# Altium footprint library PBL - THD Packages.PcbLib: 160 footprints (part 5 of 10)
Each footprint in its own frame and in the unit in brackets; x right, y up, seen from the top. Pads: shape width x height; smd on the part's side, far side on the other; paste and mask are expansions set on the pad; w line width, h text height; cw(c..) or ccw(c..) is an arc to the next point about the centre after c.
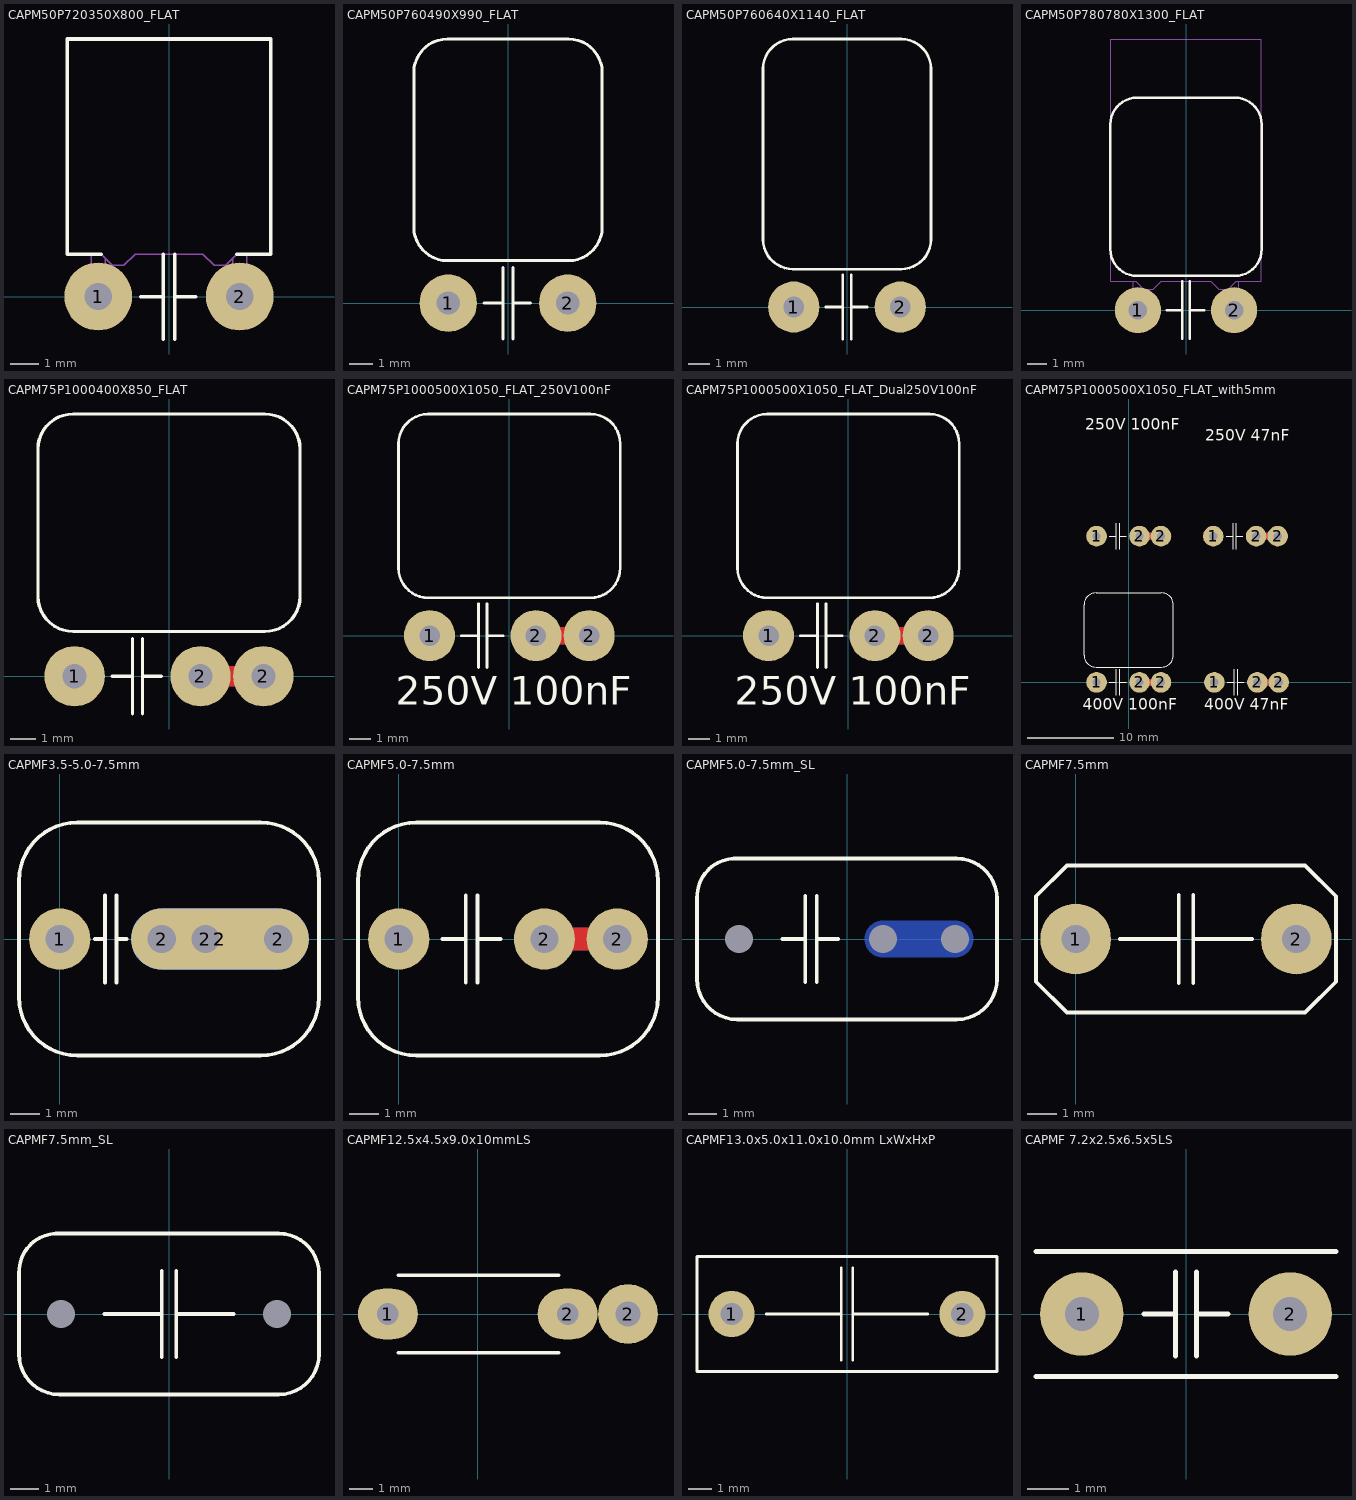
[diagram p4: the footprints below, top view; thin cyan lines are the x and y axes]

## CAPM50P720350X800_FLAT [mm] "Capacitor, THT, Metallized Polyester Film with 7.2x3.5x8.0mm LxTxH"
height 3.5
pads (2):
  round 2.4 hole 0.965: 1(-2.5,0) 2(2.5,0)
Top Overlay:
  lines w0.127: -2.4,1.5 -3.6,1.5 -3.6,9.1 3.6,9.1 3.6,1.5 2.4,1.5 ; -1,0 -0.2,0 ; -0.2,-1.5 -0.2,1.5 ; 0.2,-1.5 0.2,1.5 ; 0.2,0 0.95,0
13 - 3D Top Side:
  lines w0.05: -2.75,0.75 -2.25,0.75 ; -2.75,1.5 -2.75,0 ccw(c-2.5,0) -2.25,0 -2.25,1.35 ; 2.25,0.75 2.75,0.75 ; 2.25,1.35 2.25,0 ccw(c2.5,0) 2.75,0 2.75,1.5 ; -3.6,1.5 -3.6,9.1 3.6,9.1 3.6,1.5 2.4,1.5 2,1.1 1.6,1.1 1.2,1.5 -1.2,1.5 -1.6,1.1 -2,1.1 -2.4,1.5 -3.6,1.5
3D body: height 3.5, standoff -1.78, extent -3.6,-0.249 3.6,9.1

## CAPM50P760490X990_FLAT [mm] "Capacitor, THT, Metallized Polyester Film with 7.2x4.5x9.5mm LxTxH"
height 4.9
pads (2):
  round 2.4 hole 0.965: 1(-2.5,0) 2(2.5,0)
Top Overlay:
  lines w0.127: -1,0 -0.2,0 ; -0.2,-1.5 -0.2,1.5 ; 0.2,-1.5 0.2,1.5 ; 0.2,0 0.95,0 ; -3.937,3.175 ccw(c-2.54,3.175) -2.54,1.778 2.54,1.778 ccw(c2.54,3.175) 3.937,3.175 3.937,9.652 ccw(c2.54,9.652) 2.54,11.049 -2.54,11.049 ccw(c-2.54,9.652) -3.937,9.652 -3.937,3.175
3D body: height 4.9, standoff -1.78, extent -3.8,-0.249 3.8,11

## CAPM50P760640X1140_FLAT [mm] "Capacitor, THT, Metallized Polyester Film with 6.0x11.0x7.2mm TxHxW"
height 6.4
pads (2):
  round 2.4 hole 0.965: 1(-2.5,0) 2(2.5,0)
Top Overlay:
  lines w0.127: -1,0 -0.2,0 ; -0.2,-1.5 -0.2,1.5 ; 0.2,-1.5 0.2,1.5 ; 0.2,0 0.95,0 ; -3.937,3.175 ccw(c-2.54,3.175) -2.54,1.778 2.54,1.778 ccw(c2.54,3.175) 3.937,3.175 3.937,11.176 ccw(c2.54,11.176) 2.54,12.573 -2.54,12.573 ccw(c-2.54,11.176) -3.937,11.176 -3.937,3.175
3D body: height 6.4, standoff -1.78, extent -3.8,-0.249 3.8,12.5

## CAPM50P780780X1300_FLAT [mm] "Capacitor, THT, Metallized Polyester Film with 7.8x7.8x13.0mm LxTxH"
height 7.8
pads (2):
  round 2.4 hole 0.965: 1(-2.5,0) 2(2.5,0)
Top Overlay:
  lines w0.127: -1,0 -0.2,0 ; -0.2,-1.5 -0.2,1.5 ; 0.2,-1.5 0.2,1.5 ; 0.2,0 0.95,0 ; -3.937,3.175 ccw(c-2.54,3.175) -2.54,1.778 2.54,1.778 ccw(c2.54,3.175) 3.937,3.175 3.937,9.652 ccw(c2.54,9.652) 2.54,11.049 -2.54,11.049 ccw(c-2.54,9.652) -3.937,9.652 -3.937,3.175
13 - 3D Top Side:
  lines w0.05: -2.75,0.75 -2.25,0.75 ; -2.75,1.5 -2.75,0 ccw(c-2.5,0) -2.25,0 -2.25,1.15 ; 2.25,0.75 2.75,0.75 ; 2.25,1.15 2.25,0 ccw(c2.5,0) 2.75,0 2.75,1.5 ; -3.9,1.5 -3.9,14.1 3.9,14.1 3.9,1.5 2.6,1.5 2.2,1.1 1.7,1.1 1.3,1.5 -1.3,1.5 -1.7,1.1 -2.2,1.1 -2.6,1.5 -3.9,1.5
3D body: height 7.8, standoff -1.78, extent -3.9,-0.249 3.9,14.1

## CAPM75P1000400X850_FLAT [mm] "Capacitor, THT, Metallized Polyester Film with 3.5x9.5x10.0mm TxHxW"
height 3.5
pads (3):
  round 2.4 hole 0.965: 1(-3.75,0) 2(1.25,0) 2(3.75,0)
Top Layer:
  lines w0.813: 1.25,0 3.75,0
Bottom Layer:
  lines w0.813: 1.25,0 3.75,0
Top Overlay:
  lines w0.127: -2.25,0 -1.45,0 ; -1.45,-1.5 -1.45,1.5 ; -1.05,-1.5 -1.05,1.5 ; -1.05,0 -0.3,0 ; -5.207,3.175 ccw(c-3.81,3.175) -3.81,1.778 3.81,1.778 ccw(c3.81,3.175) 5.207,3.175 5.207,9.017 ccw(c3.81,9.017) 3.81,10.414 -3.81,10.414 ccw(c-3.81,9.017) -5.207,9.017 -5.207,3.175
3D body: height 4, standoff -1.78, extent -5,-0.249 5,9.6

## CAPM75P1000500X1050_FLAT_250V100nF [mm] "Capacitor, THT, Metallized Polyester Film with 3.5x9.5x10.0mm TxHxW"
height 3.5
pads (3):
  round 2.4 hole 0.965: 1(-3.75,0) 2(1.25,0) 2(3.75,0)
Top Layer:
  lines w0.813: 1.25,0 3.75,0
Bottom Layer:
  lines w0.813: 1.25,0 3.75,0
Top Overlay:
  lines w0.127: -2.25,0 -1.45,0 ; -1.45,-1.5 -1.45,1.5 ; -1.05,-1.5 -1.05,1.5 ; -1.05,0 -0.3,0 ; -5.207,3.175 ccw(c-3.81,3.175) -3.81,1.778 3.81,1.778 ccw(c3.81,3.175) 5.207,3.175 5.207,9.017 ccw(c3.81,9.017) 3.81,10.414 -3.81,10.414 ccw(c-3.81,9.017) -5.207,9.017 -5.207,3.175
  text "250V 100nF" at -5.334,-3.683 h2.29
3D body: height 4, standoff -1.78, extent -5,-0.249 5,9.6
3D body: height 4.5, standoff -1.78, extent -4.92,-0.249 2.38,10.6

## CAPM75P1000500X1050_FLAT_Dual250V100nF [mm] "Capacitor, THT, Metallized Polyester Film with 3.5x9.5x10.0mm TxHxW"
height 3.5
pads (3):
  round 2.4 hole 0.965: 1(-3.75,0) 2(1.25,0) 2(3.75,0)
Top Layer:
  lines w0.813: 1.25,0 3.75,0
Bottom Layer:
  lines w0.813: 1.25,0 3.75,0
Top Overlay:
  lines w0.127: -2.25,0 -1.45,0 ; -1.45,-1.5 -1.45,1.5 ; -1.05,-1.5 -1.05,1.5 ; -1.05,0 -0.3,0 ; -5.207,3.175 ccw(c-3.81,3.175) -3.81,1.778 3.81,1.778 ccw(c3.81,3.175) 5.207,3.175 5.207,9.017 ccw(c3.81,9.017) 3.81,10.414 -3.81,10.414 ccw(c-3.81,9.017) -5.207,9.017 -5.207,3.175
  text "250V 100nF" at -5.334,-3.683 h2.29
3D body: height 4.2, standoff -1.78, extent -4.5,-0.249 4.5,9.6
3D body: height 5.7, standoff -1.78, extent -4.5,-0.249 2,10.1
3D body: height 5.4, standoff -1.78, extent -5.05,-0.249 2.55,11.5
3D body: height 4.5, standoff -1.78, extent -4.9,-0.249 2.4,10.6
3D body: height 4, standoff -1.78, extent -5,-0.249 5,9.6

## CAPM75P1000500X1050_FLAT_with5mm [mm] "Capacitor, THT, Metallized Polyester Film with 3.5x9.5x10.0mm TxHxW"
height 3.5
pads (12):
  round 2.4 hole 0.965: 1(-3.75,0) 1(-3.75,17.018) 1(9.839,17.018) 1(9.966,0) 2(1.25,0) 2(1.25,17.018) 2(3.75,0) 2(3.75,17.018) 2(14.839,17.018) 2(14.966,0) 2(17.339,17.018) 2(17.466,0)
Top Layer:
  lines w0.813: 1.25,0 3.75,0 ; 1.25,17.018 3.75,17.018 ; 14.839,17.018 17.339,17.018 ; 14.966,0 17.466,0
Bottom Layer:
  lines w0.813: 1.25,0 3.75,0 ; 1.25,17.018 3.75,17.018 ; 14.839,17.018 17.339,17.018 ; 14.966,0 17.466,0
Top Overlay:
  lines w0.127: -2.25,0 -1.45,0 ; -2.25,17.018 -1.45,17.018 ; -1.45,-1.5 -1.45,1.5 ; -1.45,15.518 -1.45,18.518 ; -1.05,-1.5 -1.05,1.5 ; -1.05,0 -0.3,0 ; -1.05,15.518 -1.05,18.518 ; -1.05,17.018 -0.3,17.018 ; 11.339,17.018 12.139,17.018 ; 11.466,0 12.266,0 ; 12.139,15.518 12.139,18.518 ; 12.266,-1.5 12.266,1.5 ; 12.539,15.518 12.539,18.518 ; 12.539,17.018 13.289,17.018 ; 12.666,-1.5 12.666,1.5 ; 12.666,0 13.416,0 ; -5.207,3.175 ccw(c-3.81,3.175) -3.81,1.778 3.81,1.778 ccw(c3.81,3.175) 5.207,3.175 5.207,9.017 ccw(c3.81,9.017) 3.81,10.414 -3.81,10.414 ccw(c-3.81,9.017) -5.207,9.017 -5.207,3.175
  text "250V 47nF" at 8.89,27.686 h2.29
  text "250V 100nF" at -5.08,28.956 h2.29
  text "400V 47nF" at 8.763,-3.683 h2.29
  text "400V 100nF" at -5.334,-3.683 h2.29
3D body: height 7.8, standoff -1.78, extent -5.17,-0.249 2.63,14.1
3D body: height 5, standoff -1.78, extent -5,-0.249 5,11.6
3D body: height 4.5, standoff -1.78, extent 8.796,-0.249 16.096,10.6
3D body: height 4, standoff -1.78, extent 8.716,-0.249 18.716,9.6
3D body: height 2.5, standoff -1.78, extent 8.589,16.769 18.589,25.118
3D body: height 3.5, standoff -1.78, extent 8.719,16.769 15.919,26.118
3D body: height 4.5, standoff -1.78, extent -4.92,16.769 2.38,27.618
3D body: height 4, standoff -1.78, extent -5,16.769 5,26.618

## CAPMF3.5-5.0-7.5mm [mm] "Capacitor, THT, Metallized Polyester Film, 3.5 & 5.0 & 7.5mm pitch hybrid"
height 10
pads (6):
  round 2.1 hole 0.965: 1(0,0)
  round 1.5 hole 0.965: 2(3.5,0) 2(5,0) 2(7.5,0)
  oval 6.1x2.1 smd: 2(5.5,0)
  oval 6.1x2.1 smd far side: 2(5.5,0)
Top Overlay:
  lines w0.127: 1.2,0 1.55,0 ; 1.55,-1.5 1.55,1.5 ; 1.95,-1.5 1.95,1.5 ; 1.95,0 2.3,0 ; -1.4,-2 ccw(c0.6,-2) 0.6,-4 6.9,-4 ccw(c6.9,-2) 8.9,-2 8.9,2 ccw(c6.9,2) 6.9,4 0.6,4 ccw(c0.6,2) -1.4,2 -1.4,-2
3D body: height 11, standoff -2.54, extent -1.25,-4 8.75,4

## CAPMF5.0-7.5mm [mm] "Capacitor, THT, Metallized Polyester Film, 5 & 7.5mm pitch hybrid"
height 10
pads (3):
  round 2.1 hole 0.965: 1(0,0) 2(5,0) 2(7.5,0)
Top Layer:
  lines w0.8: 5,0 7.5,0
Bottom Layer:
  lines w0.8: 5,0 7.5,0
Top Overlay:
  lines w0.127: 1.5,0 2.3,0 ; 2.3,-1.5 2.3,1.5 ; 2.7,-1.5 2.7,1.5 ; 2.7,0 3.5,0 ; -1.4,-2 ccw(c0.6,-2) 0.6,-4 6.9,-4 ccw(c6.9,-2) 8.9,-2 8.9,2 ccw(c6.9,2) 6.9,4 0.6,4 ccw(c0.6,2) -1.4,2 -1.4,-2
3D body: height 11, standoff -2.54, extent -1.25,-4 8.75,4

## CAPMF5.0-7.5mm_SL [mil] "Capacitor, THT, Metallized Polyester Film"
height 354.33
pads (3):
  round 0 / inner round 0 / far side round 94.49 hole 38 unplated: 1(-147.64,0) 2(49.21,0) 2(147.64,0)
Bottom Layer:
  lines w50: 49.21,0 147.64,0
Top Overlay:
  lines w5: -88.58,0 -57.09,0 ; -57.09,-59.06 -57.09,59.06 ; -41.34,-59.06 -41.34,59.06 ; -41.34,0 -11.81,0 ; -205,-55 ccw(c-150,-55) -150,-110 150,-110 ccw(c150,-55) 205,-55 205,55 ccw(c150,55) 150,110 -155,110 ccw(c-152.5,57.5) -205,55 -205,-55
3D body: height 354.33, standoff -100, extent -206.69,-118.1 206.7,118.12

## CAPMF7.5mm [mm] "Capacitor, THT, Metallized Polyester Film"
height 10
pads (2):
  round 2.4 hole 0.965: 1(0,0) 2(7.5,0)
Top Overlay:
  lines w0.127: 1.5,0 3.5,0 ; 3.5,-1.5 3.5,1.5 ; 4,-1.5 4,1.5 ; 4,0 6,0 ; -1.35,-1.45 -0.3,-2.5 7.8,-2.5 8.85,-1.45 8.85,1.45 7.8,2.5 -0.3,2.5 -1.35,1.45 -1.35,-1.45
3D body: height 10, standoff 0.5, extent -1.359,-2.509 8.859,2.509

## CAPMF7.5mm_SL [mil] "Capacitor, THT, Metallized Polyester Film"
height 354.33
pads (2):
  round 0 / inner round 0 / far side round 94.49 hole 38 unplated: 1(-147.64,0) 2(147.64,0)
Top Overlay:
  lines w5: -88.58,0 -9.84,0 ; -9.84,-59.06 -9.84,59.06 ; 9.84,-59.06 9.84,59.06 ; 9.84,0 88.58,0 ; -205,-55 ccw(c-150,-55) -150,-110 150,-110 ccw(c150,-55) 205,-55 205,55 ccw(c150,55) 150,110 -155,110 ccw(c-152.5,57.5) -205,55 -205,-55
3D body: height 354.33, standoff -100, extent -196.85,-108.26 196.85,108.27

## CAPMF12.5x4.5x9.0x10mmLS [mil] "Capacitor, MF, Thru-Hole, Dipped Radial; Body 12.5 x 4.5 x 9.0 mm (WxTxH) Pin Spacing 10.0 mm (typ)"
height 354.33
pads (3):
  oval 100x85 hole 36: 1(-150,0) 2(150,0)
  round 100 hole 42: 2(251,0)
Top Overlay:
  lines w6: -132.72,-65 135,-65 ; -132.72,65 135,65
3D body: height 354.33, standoff -100, extent -196.06,-88.58 296.07,88.59

## CAPMF13.0x5.0x11.0x10.0mm LxWxHxP [mm] "Capacitor, THT, Metallized Polypropylene Film, 10mm lead pitch"
height 11
pads (2):
  round 2 hole 0.965: 1(-5,0) 2(5,0)
Top Overlay:
  lines w0.127: -3.5,0 -0.25,0 ; -0.25,-2 -0.25,2 ; 0.25,-2 0.25,2 ; 0.25,0 3.5,0 ; -6.5,-2.5 6.5,-2.5 6.5,2.5 -6.5,2.5 -6.5,-2.5
3D body: height 11, standoff 0, extent -6.5,-2.5 6.5,2.5

## CAPMF 7.2x2.5x6.5x5LS [mm] "Capacitor, THT, Metallized Polyester Film"
height 8.2
pads (2):
  round 2 hole 0.813: 1(-2.5,0) 2(2.5,0)
Top Overlay:
  lines w0.127: -3.6,-1.5 3.6,-1.5 ; -3.6,1.5 3.6,1.5 ; -1,0 -0.25,0 ; -0.25,-1 -0.25,1 ; 0.25,-1 0.25,1 ; 0.25,0 1,0
3D body: height 7.5, standoff -2, extent -3.6,-1.25 3.6,1.25